# Altium footprint library Footprints.PcbLib: 67 footprints (part 4 of 5)
Each footprint in its own frame and in the unit in brackets; x right, y up, seen from the top. Pads: shape width x height; smd on the part's side, far side on the other; paste and mask are expansions set on the pad; w line width, h text height; cw(c..) or ccw(c..) is an arc to the next point about the centre after c.
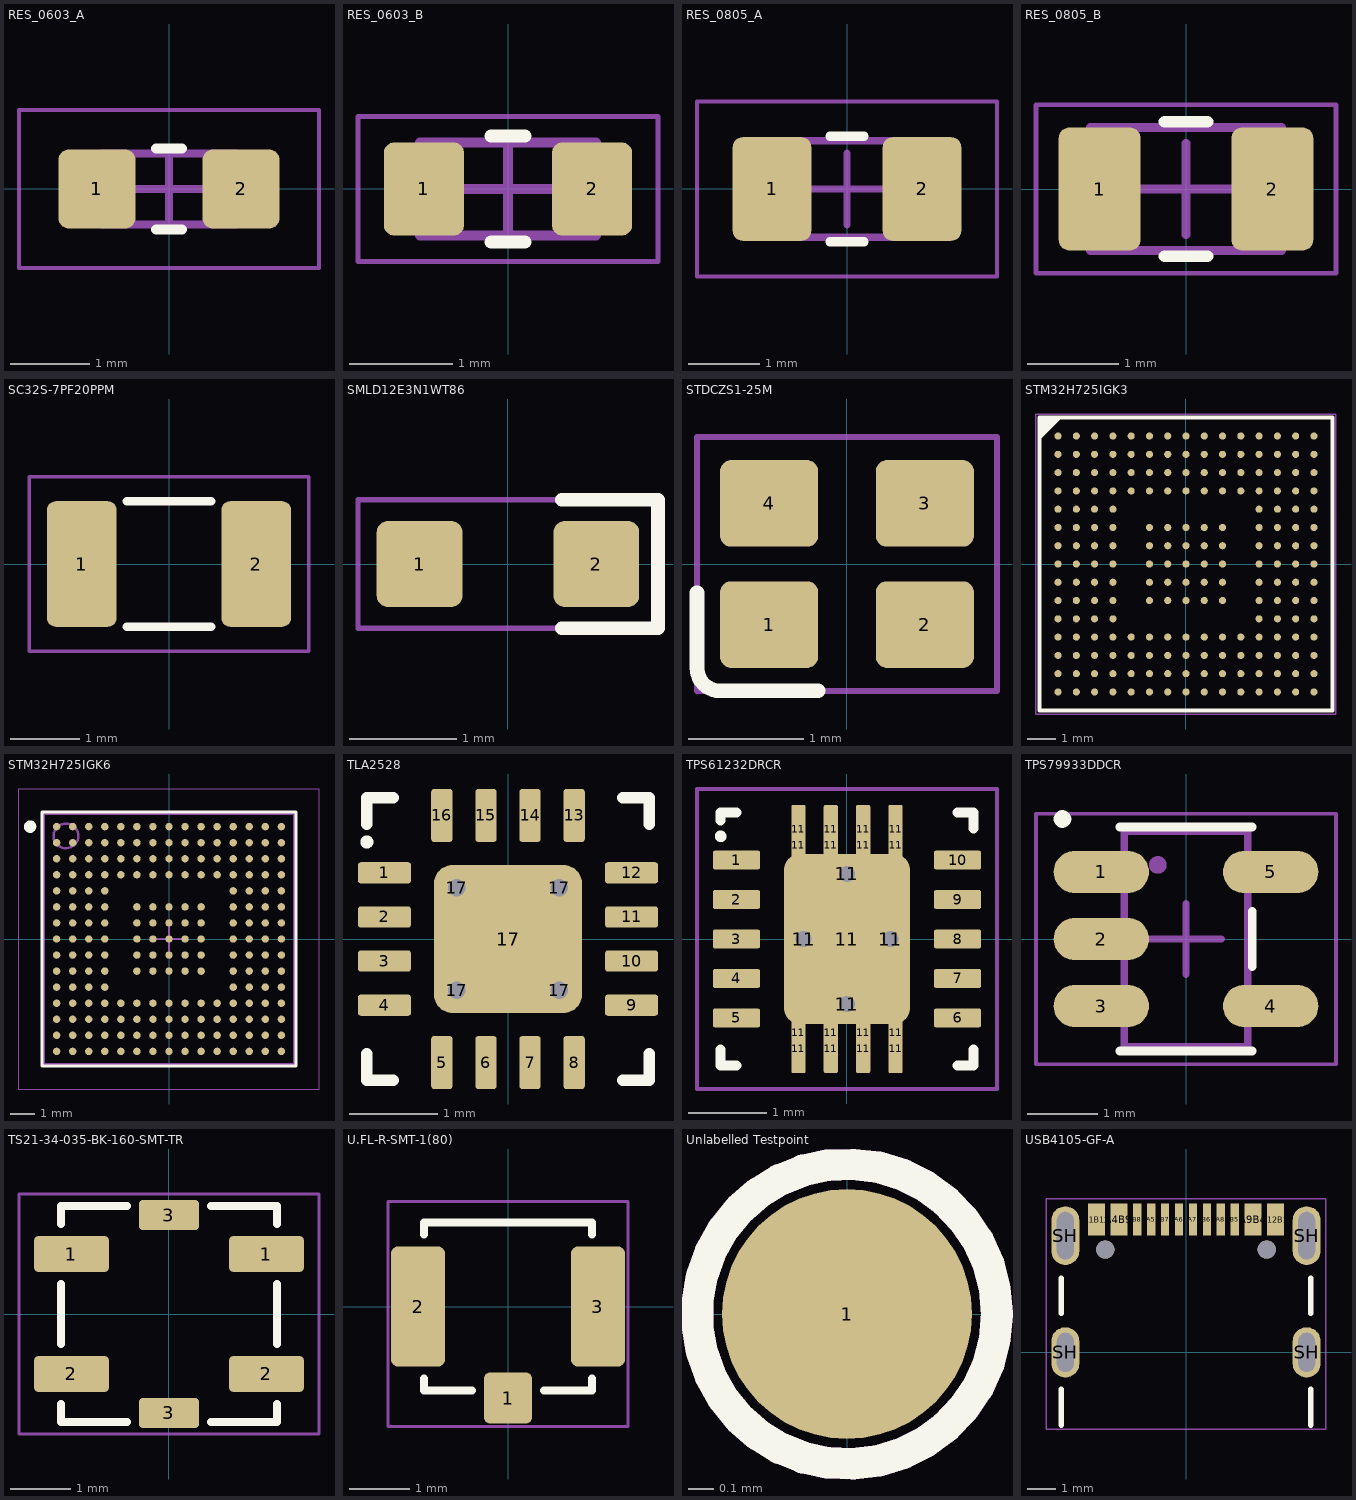
[diagram p3: the footprints below, top view; thin cyan lines are the x and y axes]

## RES_0603_A [mm] "Chip Resistor, 2-Leads, Body 1.60x0.80mm, IPC Low Density"
height 0.45
pads (2):
  rrect25% 0.975x1 smd: 1(-0.913,0) 2(0.913,0)
Top Overlay:
  lines w0.127: -0.162,-0.514 0.162,-0.514 ; -0.162,0.513 0.162,0.513
Top Courtyard:
  lines w0.05: -1.9,-1 -1.9,1 1.9,1 1.9,-1 -1.9,-1
Top Assembly:
  lines w0.1: -0.85,-0.45 -0.85,0.45 0.85,0.45 0.85,-0.45 -0.85,-0.45
Top Designator:
  text ".Designator" at -2.247,-0.225 h1
Top Component Center:
  lines w0.1: -0.45,0 0.45,0 ; 0,-0.45 0,0.45
3D body "RES_0603_A.step": height 0.45, standoff 0, extent -0.8,-0.4 0.8,0.4

## RES_0603_B [mm] "Chip Resistor, 2-Leads, Body 1.60x0.80mm, IPC Medium Density"
height 0.45
pads (2):
  rrect25% 0.775x0.9 smd: 1(-0.813,0) 2(0.813,0)
Top Overlay:
  lines w0.127: -0.162,-0.514 0.162,-0.514 ; -0.162,0.513 0.162,0.513
Top Courtyard:
  lines w0.05: -1.45,-0.7 1.45,-0.7 1.45,0.7 -1.45,0.7 -1.45,-0.7
Top Assembly:
  lines w0.1: -0.85,-0.45 0.85,-0.45 0.85,0.45 -0.85,0.45 -0.85,-0.45
Top Designator:
  text ".Designator" at -2.247,-0.225 h1
Top Component Center:
  lines w0.1: -0.45,0 0.45,0 ; 0,-0.45 0,0.45
3D body "RES_0603_B.step": height 0.45, standoff 0, extent -0.8,-0.4 0.8,0.4

## RES_0805_A [mm] "Chip Resistor, 2-Leads, Body 2.00x1.25mm, IPC Low Density"
height 0.5
pads (2):
  rrect25% 1.1x1.45 smd: 1(-1.05,0) 2(1.05,0)
Top Overlay:
  lines w0.127: -0.236,-0.738 0.236,-0.738 ; -0.236,0.738 0.236,0.738
Top Courtyard:
  lines w0.05: -2.1,-1.225 -2.1,1.225 2.1,1.225 2.1,-1.225 -2.1,-1.225
Top Assembly:
  lines w0.1: -1.05,-0.675 -1.05,0.675 1.05,0.675 1.05,-0.675 -1.05,-0.675
Top Designator:
  text ".Designator" at -2.247,-0.225 h1
Top Component Center:
  lines w0.1: -0.5,0 0.5,0 ; 0,-0.5 0,0.5
3D body "RES_0805_A.step": height 0.5, standoff 0, extent -1,-0.625 1,0.625

## RES_0805_B [mm] "Chip Resistor, 2-Leads, Body 2.00x1.25mm, IPC Medium Density"
height 0.5
pads (2):
  rrect25% 0.9x1.35 smd: 1(-0.95,0) 2(0.95,0)
Top Overlay:
  lines w0.127: -0.236,-0.738 0.236,-0.738 ; -0.236,0.738 0.236,0.738
Top Courtyard:
  lines w0.05: -1.65,-0.925 -1.65,0.925 1.65,0.925 1.65,-0.925 -1.65,-0.925
Top Assembly:
  lines w0.1: -1.05,-0.675 -1.05,0.675 1.05,0.675 1.05,-0.675 -1.05,-0.675
Top Designator:
  text ".Designator" at -2.247,-0.225 h1
Top Component Center:
  lines w0.1: -0.5,0 0.5,0 ; 0,-0.5 0,0.5
3D body "RES_0805_B.step": height 0.5, standoff 0, extent -1,-0.625 1,0.625

## SC32S-7PF20PPM [mm] "32.768 kHz ±20ppm Crystal 7pF 70 kOhms 2-SMD, No Lead"
pads (2):
  rrect25% 1x1.8 smd: 1(-1.25,0) 2(1.25,0)
Top Overlay:
  lines w0.127: -0.6,-0.9 0.6,-0.9 ; -0.6,0.9 0.6,0.9
Top Courtyard:
  lines w0.05: -2,-1.25 2,-1.25 2,1.25 -2,1.25 -2,-1.25
Top Designator:
  text ".Designator" at -2.247,-0.225 h1
3D body "XTAL_SC32S-7PF20PPM_EPS.step": height 0.84, standoff 0, extent -1.651,-0.8 1.651,0.8

## SMLD12E3N1WT86 [mm] "Blue-Green 496nm LED Indication - Discrete 2.9V 0603 (1608 Metric)"
pads (2):
  rrect25% 0.8x0.8 smd: 1(-0.825,0) 2(0.825,0)
Top Overlay:
  lines w0.127: 0.5,-0.6 1.4,-0.6 1.4,0.6 0.5,0.6
Top Courtyard:
  lines w0.05: -1.4,-0.6 1.4,-0.6 1.4,0.6 -1.4,0.6 -1.4,-0.6
Top Designator:
  text ".Designator" at -2.247,-0.225 h1
3D body "SMLD12E3N1WT86.step": height 0.55, standoff 0, extent -0.8,-0.4 0.8,0.4

## STDCZS1-25M [mm] "25 MHz ±15ppm Crystal 8pF 80 Ohms 4-SMD, No Lead"
pads (4):
  rrect25% 0.85x0.75 smd: 1(-0.675,-0.525) 2(0.675,-0.525) 3(0.675,0.525) 4(-0.675,0.525)
Top Overlay:
  lines w0.127: -1.3,-0.25 -1.3,-0.9 ccw(c-1.1,-0.9) -1.1,-1.1 -0.25,-1.1
Top Courtyard:
  lines w0.05: -1.3,-1.1 1.3,-1.1 1.3,1.1 -1.3,1.1 -1.3,-1.1
3D body "NX2016SA_NDK.step": height 0.51, standoff 0, extent -1.054,-0.851 1.054,0.851

## STM32H725IGK3 [mil]
pads (201):
  round 10 smd paste+0 mask+0: A1(-179.13,179.13) A2(-153.54,179.13) A3(-127.95,179.13) A4(-102.36,179.13) A5(-76.77,179.13) A6(-51.18,179.13) A7(-25.59,179.13) A8(0,179.13) A9(25.59,179.13) A10(51.18,179.13) A11(76.77,179.13) A12(102.36,179.13) A13(127.95,179.13) A14(153.54,179.13) A15(179.13,179.13) B1(-179.13,153.54) B2(-153.54,153.54) B3(-127.95,153.54) B4(-102.36,153.54) B5(-76.77,153.54) B6(-51.18,153.54) B7(-25.59,153.54) B8(0,153.54) B9(25.59,153.54) B10(51.18,153.54) B11(76.77,153.54) B12(102.36,153.54) B13(127.95,153.54) B14(153.54,153.54) B15(179.13,153.54) C1(-179.13,127.95) C2(-153.54,127.95) C3(-127.95,127.95) C4(-102.36,127.95) C5(-76.77,127.95) C6(-51.18,127.95) C7(-25.59,127.95) C8(0,127.95) C9(25.59,127.95) C10(51.18,127.95) C11(76.77,127.95) C12(102.36,127.95) C13(127.95,127.95) C14(153.54,127.95) C15(179.13,127.95) D1(-179.13,102.36) D2(-153.54,102.36) D3(-127.95,102.36) D4(-102.36,102.36) D5(-76.77,102.36) D6(-51.18,102.36) D7(-25.59,102.36) D8(0,102.36) D9(25.59,102.36) D10(51.18,102.36) D11(76.77,102.36) D12(102.36,102.36) D13(127.95,102.36) D14(153.54,102.36) D15(179.13,102.36) E1(-179.13,76.77) E2(-153.54,76.77) E3(-127.95,76.77) E4(-102.36,76.77) E12(102.36,76.77) E13(127.95,76.77) E14(153.54,76.77) E15(179.13,76.77) F1(-179.13,51.18) F2(-153.54,51.18) F3(-127.95,51.18) F4(-102.36,51.18) F6(-51.18,51.18) F7(-25.59,51.18) F8(0,51.18) F9(25.59,51.18) F10(51.18,51.18) F12(102.36,51.18) F13(127.95,51.18) F14(153.54,51.18) F15(179.13,51.18) G1(-179.13,25.59) G2(-153.54,25.59) G3(-127.95,25.59) G4(-102.36,25.59) G6(-51.18,25.59) G7(-25.59,25.59) G8(0,25.59) G9(25.59,25.59) G10(51.18,25.59) G12(102.36,25.59) G13(127.95,25.59) G14(153.54,25.59) G15(179.13,25.59) H1(-179.13,0) H2(-153.54,0) H3(-127.95,0) H4(-102.36,0) H6(-51.18,0) H7(-25.59,0) H8(0,0) H9(25.59,0) H10(51.18,0) H12(102.36,0) H13(127.95,0) H14(153.54,0) H15(179.13,0) J1(-179.13,-25.59) J2(-153.54,-25.59) J3(-127.95,-25.59) J4(-102.36,-25.59) J6(-51.18,-25.59) J7(-25.59,-25.59) J8(0,-25.59) J9(25.59,-25.59) J10(51.18,-25.59) J12(102.36,-25.59) J13(127.95,-25.59) J14(153.54,-25.59) J15(179.13,-25.59) K1(-179.13,-51.18) K2(-153.54,-51.18) K3(-127.95,-51.18) K4(-102.36,-51.18) K6(-51.18,-51.18) K7(-25.59,-51.18) K8(0,-51.18) K9(25.59,-51.18) K10(51.18,-51.18) K12(102.36,-51.18) K13(127.95,-51.18) K14(153.54,-51.18) K15(179.13,-51.18) L1(-179.13,-76.77) L2(-153.54,-76.77) L3(-127.95,-76.77) L4(-102.36,-76.77) L12(102.36,-76.77) L13(127.95,-76.77) L14(153.54,-76.77) L15(179.13,-76.77) M1(-179.13,-102.36) M2(-153.54,-102.36) M3(-127.95,-102.36) M4(-102.36,-102.36) M5(-76.77,-102.36) M6(-51.18,-102.36) M7(-25.59,-102.36) M8(0,-102.36) M9(25.59,-102.36) M10(51.18,-102.36) M11(76.77,-102.36) M12(102.36,-102.36) M13(127.95,-102.36) M14(153.54,-102.36) M15(179.13,-102.36) N1(-179.13,-127.95) N2(-153.54,-127.95) N3(-127.95,-127.95) N4(-102.36,-127.95) N5(-76.77,-127.95) N6(-51.18,-127.95) N7(-25.59,-127.95) N8(0,-127.95) N9(25.59,-127.95) N10(51.18,-127.95) N11(76.77,-127.95) N12(102.36,-127.95) N13(127.95,-127.95) N14(153.54,-127.95) N15(179.13,-127.95) P1(-179.13,-153.54) P2(-153.54,-153.54) P3(-127.95,-153.54) P4(-102.36,-153.54) P5(-76.77,-153.54) P6(-51.18,-153.54) P7(-25.59,-153.54) P8(0,-153.54) P9(25.59,-153.54) P10(51.18,-153.54) P11(76.77,-153.54) P12(102.36,-153.54) P13(127.95,-153.54) P14(153.54,-153.54) P15(179.13,-153.54) R1(-179.13,-179.13) R2(-153.54,-179.13) R3(-127.95,-179.13) R4(-102.36,-179.13) R5(-76.77,-179.13) R6(-51.18,-179.13) R7(-25.59,-179.13) R8(0,-179.13) R9(25.59,-179.13) R10(51.18,-179.13) R11(76.77,-179.13) R12(102.36,-179.13) R13(127.95,-179.13) R14(153.54,-179.13) R15(179.13,-179.13)
Top Overlay:
  region: -205,205 -205,177.17 -177.17,205
  lines w5: -205,177.17 -177.17,205
  lines w6: -205,-205 205,-205 205,205 -205,205 -205,-205
Top Courtyard:
  lines w1.97: -210,-210 210,-210 210,210 -210,210 -210,-210
Top Designator:
  text ".Designator" at -88.45,-8.88 h39.37
3D body "BGA_725IGK6_STM.step": height 24.09, standoff 0, extent -200,-200 200,200

## STM32H725IGK6 [mm] "BGA, 196-Leads, Body 10.00x10.00mmx0.60mm, Pitch 0.65mm"
height 0.6
pads (201):
  round 0.3 smd: A1(-4.55,4.55) A2(-3.9,4.55) A3(-3.25,4.55) A4(-2.6,4.55) A5(-1.95,4.55) A6(-1.3,4.55) A7(-0.65,4.55) A8(0,4.55) A9(0.65,4.55) A10(1.3,4.55) A11(1.95,4.55) A12(2.6,4.55) A13(3.25,4.55) A14(3.9,4.55) A15(4.55,4.55) B1(-4.55,3.9) B2(-3.9,3.9) B3(-3.25,3.9) B4(-2.6,3.9) B5(-1.95,3.9) B6(-1.3,3.9) B7(-0.65,3.9) B8(0,3.9) B9(0.65,3.9) B10(1.3,3.9) B11(1.95,3.9) B12(2.6,3.9) B13(3.25,3.9) B14(3.9,3.9) B15(4.55,3.9) C1(-4.55,3.25) C2(-3.9,3.25) C3(-3.25,3.25) C4(-2.6,3.25) C5(-1.95,3.25) C6(-1.3,3.25) C7(-0.65,3.25) C8(0,3.25) C9(0.65,3.25) C10(1.3,3.25) C11(1.95,3.25) C12(2.6,3.25) C13(3.25,3.25) C14(3.9,3.25) C15(4.55,3.25) D1(-4.55,2.6) D2(-3.9,2.6) D3(-3.25,2.6) D4(-2.6,2.6) D5(-1.95,2.6) D6(-1.3,2.6) D7(-0.65,2.6) D8(0,2.6) D9(0.65,2.6) D10(1.3,2.6) D11(1.95,2.6) D12(2.6,2.6) D13(3.25,2.6) D14(3.9,2.6) D15(4.55,2.6) E1(-4.55,1.95) E2(-3.9,1.95) E3(-3.25,1.95) E4(-2.6,1.95) E12(2.6,1.95) E13(3.25,1.95) E14(3.9,1.95) E15(4.55,1.95) F1(-4.55,1.3) F2(-3.9,1.3) F3(-3.25,1.3) F4(-2.6,1.3) F6(-1.3,1.3) F7(-0.65,1.3) F8(0,1.3) F9(0.65,1.3) F10(1.3,1.3) F12(2.6,1.3) F13(3.25,1.3) F14(3.9,1.3) F15(4.55,1.3) G1(-4.55,0.65) G2(-3.9,0.65) G3(-3.25,0.65) G4(-2.6,0.65) G6(-1.3,0.65) G7(-0.65,0.65) G8(0,0.65) G9(0.65,0.65) G10(1.3,0.65) G12(2.6,0.65) G13(3.25,0.65) G14(3.9,0.65) G15(4.55,0.65) H1(-4.55,0) H2(-3.9,0) H3(-3.25,0) H4(-2.6,0) H6(-1.3,0) H7(-0.65,0) H8(0,0) H9(0.65,0) H10(1.3,0) H12(2.6,0) H13(3.25,0) H14(3.9,0) H15(4.55,0) J1(-4.55,-0.65) J2(-3.9,-0.65) J3(-3.25,-0.65) J4(-2.6,-0.65) J6(-1.3,-0.65) J7(-0.65,-0.65) J8(0,-0.65) J9(0.65,-0.65) J10(1.3,-0.65) J12(2.6,-0.65) J13(3.25,-0.65) J14(3.9,-0.65) J15(4.55,-0.65) K1(-4.55,-1.3) K2(-3.9,-1.3) K3(-3.25,-1.3) K4(-2.6,-1.3) K6(-1.3,-1.3) K7(-0.65,-1.3) K8(0,-1.3) K9(0.65,-1.3) K10(1.3,-1.3) K12(2.6,-1.3) K13(3.25,-1.3) K14(3.9,-1.3) K15(4.55,-1.3) L1(-4.55,-1.95) L2(-3.9,-1.95) L3(-3.25,-1.95) L4(-2.6,-1.95) L12(2.6,-1.95) L13(3.25,-1.95) L14(3.9,-1.95) L15(4.55,-1.95) M1(-4.55,-2.6) M2(-3.9,-2.6) M3(-3.25,-2.6) M4(-2.6,-2.6) M5(-1.95,-2.6) M6(-1.3,-2.6) M7(-0.65,-2.6) M8(0,-2.6) M9(0.65,-2.6) M10(1.3,-2.6) M11(1.95,-2.6) M12(2.6,-2.6) M13(3.25,-2.6) M14(3.9,-2.6) M15(4.55,-2.6) N1(-4.55,-3.25) N2(-3.9,-3.25) N3(-3.25,-3.25) N4(-2.6,-3.25) N5(-1.95,-3.25) N6(-1.3,-3.25) N7(-0.65,-3.25) N8(0,-3.25) N9(0.65,-3.25) N10(1.3,-3.25) N11(1.95,-3.25) N12(2.6,-3.25) N13(3.25,-3.25) N14(3.9,-3.25) N15(4.55,-3.25) P1(-4.55,-3.9) P2(-3.9,-3.9) P3(-3.25,-3.9) P4(-2.6,-3.9) P5(-1.95,-3.9) P6(-1.3,-3.9) P7(-0.65,-3.9) P8(0,-3.9) P9(0.65,-3.9) P10(1.3,-3.9) P11(1.95,-3.9) P12(2.6,-3.9) P13(3.25,-3.9) P14(3.9,-3.9) P15(4.55,-3.9) R1(-4.55,-4.55) R2(-3.9,-4.55) R3(-3.25,-4.55) R4(-2.6,-4.55) R5(-1.95,-4.55) R6(-1.3,-4.55) R7(-0.65,-4.55) R8(0,-4.55) R9(0.65,-4.55) R10(1.3,-4.55) R11(1.95,-4.55) R12(2.6,-4.55) R13(3.25,-4.55) R14(3.9,-4.55) R15(4.55,-4.55)
Top Overlay:
  circle w0.25: c-5.625,4.55 r0.125
  lines w0.127: -5.139,-5.138 5.138,-5.138 5.138,5.139 -5.139,5.139 -5.139,-5.138
Top Courtyard:
  lines w0.05: -6.075,-6.075 6.075,-6.075 6.075,6.075 -6.075,6.075 -6.075,-6.075
Top Assembly:
  circle w0.1: c-4.175,4.175 r0.5
  lines w0.1: -5.075,-5.075 5.075,-5.075 5.075,5.075 -5.075,5.075 -5.075,-5.075
Top Designator:
  text ".Designator" at 0,0.188 h1
Top Component Center:
  lines w0.1: -0.5,0 0.5,0 ; 0,-0.5 0,0.5
3D body "STM32H725IGK6.step": height 0.6, standoff 0, extent -5,-5 5,5

## TLA2528 [mm]
pads (21):
  rrect25% 0.6x0.24 smd: 1(-1.4,0.75) 2(-1.4,0.25) 3(-1.4,-0.25) 4(-1.4,-0.75) 9(1.4,-0.75) 10(1.4,-0.25) 11(1.4,0.25) 12(1.4,0.75)
  rrect25% 0.24x0.6 smd: 5(-0.75,-1.4) 6(-0.25,-1.4) 7(0.25,-1.4) 8(0.75,-1.4) 13(0.75,1.4) 14(0.25,1.4) 15(-0.25,1.4) 16(-0.75,1.4)
  round 0.3 hole 0.2: 17(-0.58,-0.58) 17(-0.58,0.58) 17(0.58,-0.58) 17(0.58,0.58)
  rrect25% 1.68x1.68 smd: 17(0,0)
Top Overlay:
  circle w0.127: c-1.6,1.1 r0.01
  lines w0.127: -1.6,-1.3 -1.6,-1.6 -1.3,-1.6 ; -1.6,1.3 -1.6,1.6 -1.3,1.6 ; 1.3,-1.6 1.6,-1.6 1.6,-1.3 ; 1.3,1.6 1.6,1.6 1.6,1.3
Top Designator:
  text ".Designator" at -2.247,-0.225 h1
3D body "TLA2528IRTER.STEP": height 0.8, standoff 0, extent -1.5,-1.5 1.5,1.5

## TPS61232DRCR [mm] "Boost Switching Regulator IC Positive Fixed 5V 1 Output 5A (Switch) 10-VFDFN Exposed Pad"
pads (31):
  rrect25% 0.6x0.24 smd: 1(-1.4,1) 2(-1.4,0.5) 3(-1.4,0) 4(-1.4,-0.5) 5(-1.4,-1) 6(1.4,-1) 7(1.4,-0.5) 8(1.4,0) 9(1.4,0.5) 10(1.4,1)
  rrect25% 0.18x0.625 smd: 11(-0.615,-1.388) 11(-0.615,-1.188) 11(-0.615,1.188) 11(-0.615,1.388) 11(-0.205,-1.388) 11(-0.205,-1.188) 11(-0.205,1.188) 11(-0.205,1.388) 11(0.205,-1.388) 11(0.205,-1.188) 11(0.205,1.188) 11(0.205,1.388) 11(0.615,-1.388) 11(0.615,-1.188) 11(0.615,1.188) 11(0.615,1.388)
  round 0.4 hole 0.2: 11(-0.55,0) 11(0,-0.825) 11(0,0.825) 11(0.55,0)
  rrect25% 1.6x2.15 smd: 11(0,0)
Top Overlay:
  circle w0.127: c-1.6,1.3 r0.01
  lines w0.127: -1.6,-1.4 -1.6,-1.6 -1.4,-1.6 ; -1.6,1.5 -1.6,1.6 -1.4,1.6 ; 1.4,-1.6 1.6,-1.6 1.6,-1.4 ; 1.4,1.6 1.6,1.6 1.6,1.4
Top Courtyard:
  lines w0.05: -1.9,-1.9 1.9,-1.9 1.9,1.9 -1.9,1.9 -1.9,-1.9
Top Designator:
  text ".Designator" at -2.247,-0.225 h1
3D body "DRC0010G.stp": height 0.77, standoff 0, extent -1.5,-1.5 1.5,1.5

## TPS79933DDCR [mm] "SOT23, 5-Leads, Body 2.90x2.80mm, Pitch 0.95mm, IPC Medium Density"
height 1.1
pads (5):
  oval 1.35x0.6 smd: 1(-1.2,0.95) 2(-1.2,0) 3(-1.2,-0.95) 4(1.2,-0.95) 5(1.2,0.95)
Top Overlay:
  circle w0.125: c-1.75,1.7 r0.062
  lines w0.127: -0.938,-1.588 0.938,-1.588 ; -0.938,1.589 0.938,1.589 ; 0.938,-0.386 0.938,0.386
Top Courtyard:
  lines w0.05: -2.125,-1.775 -2.125,1.775 2.125,1.775 2.125,-1.775 -2.125,-1.775
Top Assembly:
  circle w0.125: c-0.4,1.05 r0.062
  lines w0.1: -0.875,-1.525 -0.875,1.525 0.875,1.525 0.875,-1.525 -0.875,-1.525
Top Designator:
  text ".Designator" at -2.247,-0.225 h1
Top Component Center:
  lines w0.1: -0.5,0 0.5,0 ; 0,-0.5 0,0.5
3D body "TPS79933DDCR.step": height 1.1, standoff 0, extent -1.525,-1.45 1.525,1.45

## TS21-34-035-BK-160-SMT-TR [mm] "Tactile Switch SPST-NO Top Actuated Surface Mount"
pads (6):
  rrect25% 1.25x0.6 smd: 1(-1.625,1) 1(1.625,1) 2(-1.625,-1) 2(1.625,-1)
  rrect25% 1x0.5 smd: 3(0,-1.65) 3(0,1.65)
Top Overlay:
  lines w0.127: -1.8,-1.5 -1.8,-1.8 -0.7,-1.8 ; -1.8,-0.5 -1.8,0.5 ; -1.8,1.5 -1.8,1.8 -0.7,1.8 ; 0.7,-1.8 1.8,-1.8 1.8,-1.5 ; 0.7,1.8 1.8,1.8 1.8,1.5 ; 1.8,-0.5 1.8,0.5
Top Courtyard:
  lines w0.05: -2.5,-2 2.5,-2 2.5,2 -2.5,2 -2.5,-2
Top Designator:
  text ".Designator" at -2.247,-0.225 h1
3D body "TS21-34-035-BK-160-SMT-TR--3DModel-STEP-242080.STEP": height 1.5, standoff 0, extent -2,-1.7 2,1.7

## U.FL-R-SMT-1(80) [mm] "U.FL (UMCC) Connector Receptacle, Male Pin 50 Ohms Surface Mount Solder"
pads (3):
  rrect25% 0.8x0.85 smd: 1(0,-1.525)
  rrect25% 0.9x2 smd: 2(-1.5,0) 3(1.5,0)
Top Overlay:
  lines w0.127: -1.4,-1.2 -1.4,-1.4 -0.6,-1.4 ; -1.4,1.2 -1.4,1.4 1.4,1.4 1.4,1.2 ; 0.6,-1.4 1.4,-1.4 1.4,-1.2
Top Courtyard:
  lines w0.05: -2,-2 2,-2 2,1.75 -2,1.75 -2,-2
Top Designator:
  text ".Designator" at -2.247,-0.225 h1
3D body "U.FL-R-SMT-1.step": height 1.25, standoff 0, extent -1.5,-1.55 1.5,1.55

## Unlabelled Testpoint [mm] "1.5mm Diameter testpoint"
pads (1):
  round 1 smd paste-2539.97: 1(0,0)
Top Overlay:
  circle w0.127: c0,0 r0.6
Top Courtyard:
  circle w0.127: c0,0 r0.6
Top Designator:
  text ".Designator" at -2.247,-0.225 h1

## USB4105-GF-A [mm] "USB-C (USB TYPE-C) USB 2.0 Receptacle Connector 24 (16+8 Dummy) Position Surface Mount, Right Angle; Through Hole"
pads (18):
  rect 0.6x1.15 smd mask+0.05: A1B12(-3.2,4.755) A4B9(-2.4,4.755) A9B4(2.4,4.755) A12B1(3.2,4.755)
  rect 0.3x1.15 smd mask+0.05: A5(-1.25,4.755) A6(-0.25,4.755) A7(0.25,4.755) A8(1.25,4.755) B5(1.75,4.755) B6(0.75,4.755) B7(-0.75,4.755) B8(-1.75,4.755)
  oval 1x1.8 hole 0.6 slot 1.4 at 90 deg paste+0: SH(-4.32,0) SH(4.32,0)
  oval 1x2.1 hole 0.6 slot 1.7 at 90 deg paste+0: SH(-4.32,4.18) SH(4.32,4.18)
  round 0.65 hole 0.65 unplated: ""(-2.89,3.68) ""(2.89,3.68)
Top Overlay:
  lines w0.2: -4.47,-2.6 -4.47,-1.32 ; -4.47,1.4 -4.47,2.65 ; 4.47,-2.6 4.47,-1.32 ; 4.47,1.4 4.47,2.65
Top Courtyard:
  lines w0.05: -5,-2.75 5,-2.75 5,5.5 -5,5.5 -5,-2.75
Top Designator:
  text ".Designator" at -2.247,-0.225 h1
3D body "USB4105-GF-A.STEP": height 3.31, standoff -1.1, extent -4.47,-2.6 4.47,5.11